# Altium integrated library SN74LVC3G17DCUR.IntLib: 1 symbol
Pins are listed as number, name and electrical type; pins without a type are passive.

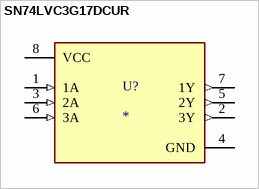
[diagram p0: symbol SN74LVC3G17DCUR]

## SN74LVC3G17DCUR
designator U?
3-ch, 1.65-V to 5.5-V buffers with Schmitt-Trigger inputs; MF: Texas Instruments; MP: SN74LVC3G17DCUR; SnapEDA_Link: https://www.snapeda.com/parts/SN74LVC3G17DCUR/Texas+Instruments/view-part/?ref=snap; Package: VSSOP-8 Texas Instruments; Value: *; Check_prices: https://www.snapeda.com/parts/SN74LVC3G17DCUR/Texas+Instruments/view-part/?ref=eda
footprint SOP50P310X90-8N
pins: 1 1A (in), 2 3Y (out), 3 2A (in), 4 GND (power), 5 2Y (out), 6 3A (in), 7 1Y (out), 8 VCC (power)